# Altium schematic symbol library Water Tank Telemeter_1.SCHLIB: 82 symbols
Pins are listed as number, name and electrical type; pins without a type are passive.

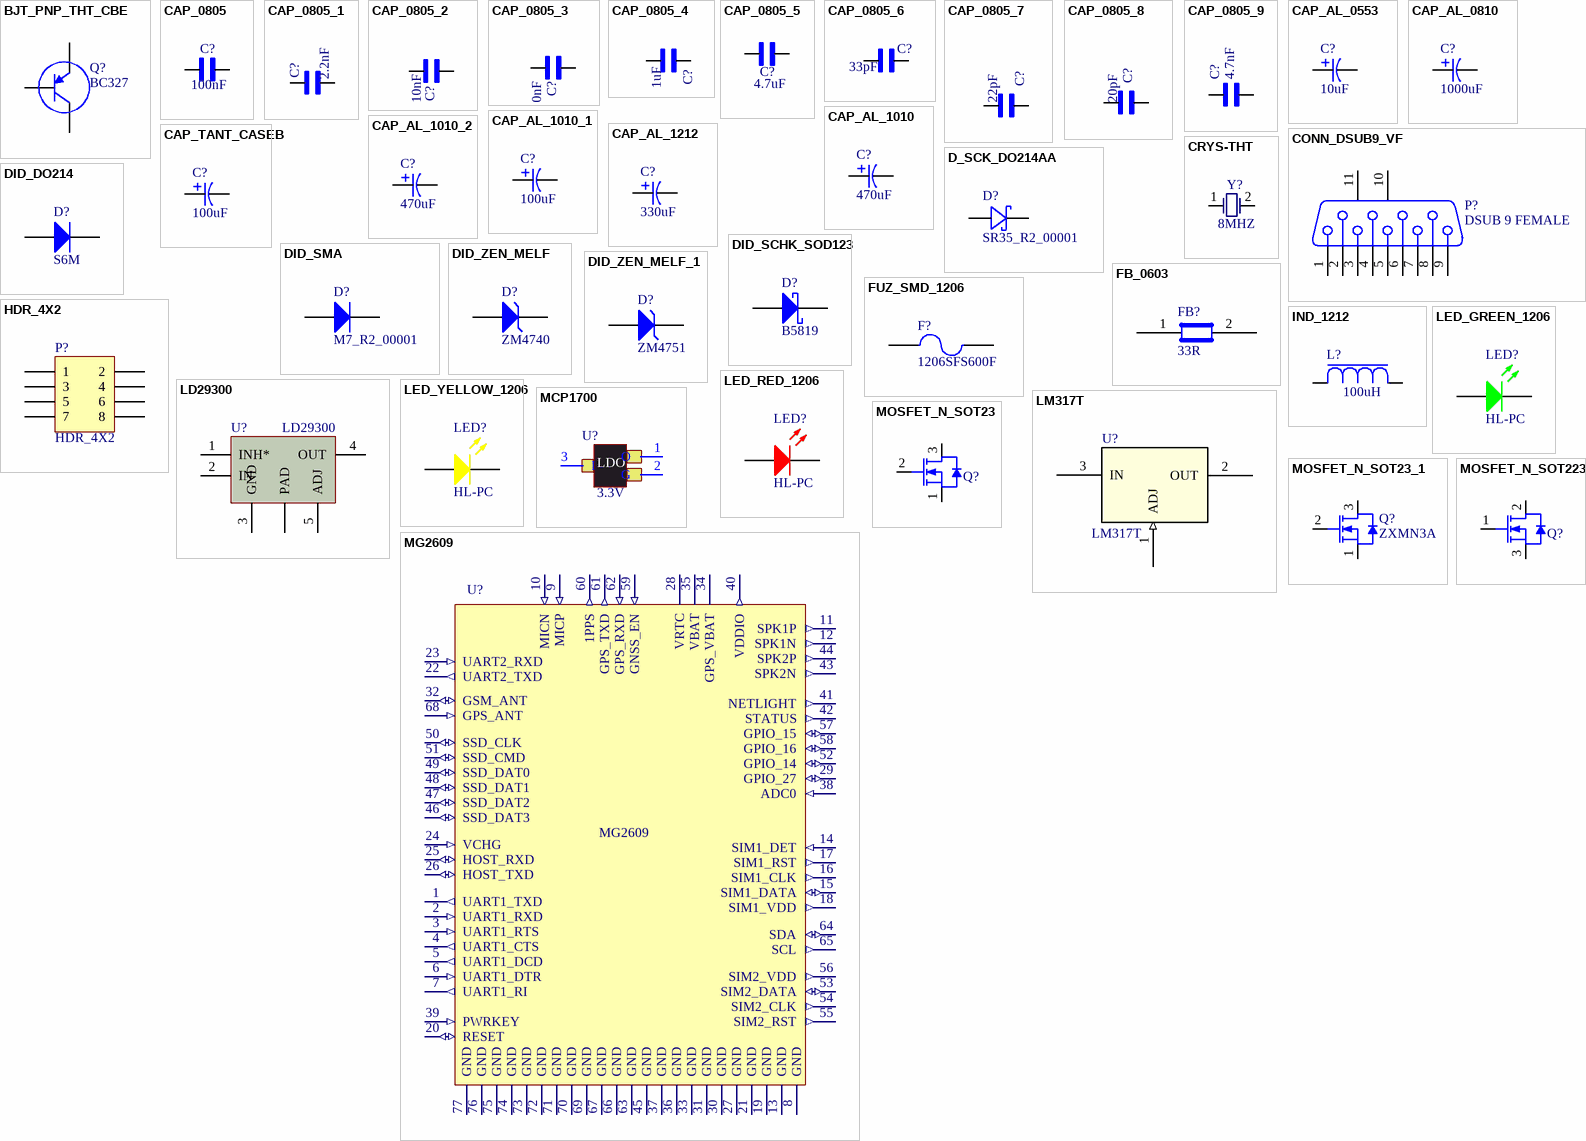
[diagram p0: symbols BJT_PNP_THT_CBE to MOSFET_N_SOT223]

## BJT_PNP_THT_CBE
designator Q?, comment BC327
=Product Description; Product Name: BC327-40ZL1G; Product Description: TRANSISTOR DIS.500mA 50V PNP TO92 AMP THT	TRANSISTOR DIS.500mA 50V PNP TO92 AMP THT; Package: TO-92; Value: BC327
footprint TO-92
pins: 1 C, 2 B, 3 E

## CAP_0805
designator C?, comment 100nF
Product Name: CL21B104JBCNNNC; Product Description: MLCC (2012) 0805 100nF 50VDC ±5% X7R; .Checked PCB: CHK; Package: 0805; Value: 100nF; .Checked SCH: CHK
footprint CAP_0805
pins: 1, 2

## CAP_0805_1
designator C?, comment 2.2nF
=Product Description; Product Name: CL21B222JBANNNC; Product Description: MLCC (2012) 0805 2.2nF 50VDC ±5% X7R; .Checked PCB: CHK; Package: 0805; Value: 2.2nF; .Checked SCH: CHK
footprint CAP_0805
pins: 1, 2

## CAP_0805_2
designator C?, comment 10nF
Product Name: CL21C103JBFNNNE; Product Description: MLCC (2012) 0805 10nF 50VDC ±5% C0G (NP0); .Checked PCB: CHK; Package: 0805; Value: 10nF; .Checked SCH: CHK
footprint CAP_0805
pins: 1, 2

## CAP_0805_3
designator C?, comment 330nF
=Product Description; Manufacturer: SAMSUNG; Product Name: CL21B334KOCNNNC; Product Description: MLCC (2012) 0805 330nF 16VDC ±10% X7R; .Checked PCB: CHK; Value: 330nF; Package / Case: 0805; .Checked SCH: CHK
footprint CAP_0805
pins: 1, 2

## CAP_0805_4
designator C?, comment 1uF
Product Name: CL21F105ZBFNNNE; Product Description: MLCC (2012) 0805 1uF 50VDC -20% +80% Y5V; .Checked PCB: CHK; Package: 0805; Value: 1uF; .Checked SCH: CHK
footprint CAP_0805
pins: 1, 2

## CAP_0805_5
designator C?, comment 4.7uF
MLCC (2012) 0805 4.7uF 25VDC ±10% X5R; Product Name: CL21A475KAQNNNE; .Checked PCB: CHK; Package: 0805; Product Description: MLCC (2012) 0805 4.7uF 25VDC ±10% X5R; Value: 4.7uF; .Checked SCH: CHK
footprint CAP_0805
pins: 1, 2

## CAP_0805_6
designator C?, comment 33pF
Product Name: CL21C330GBANNNC; Product Description: MLCC (2012) 0805 33pF 50VDC ±2% C0G (NP0); .Checked PCB: CHK; Package: 0805; Value: 33pF; .Checked SCH: CHK
footprint CAP_0805
pins: 1, 2

## CAP_0805_7
designator C?, comment 22pF
Product Name: CL21C220JBANNNC; Product Description: MLCC (2012) 0805 22pF 50VDC ±5% C0G (NP0); .Checked PCB: CHK; Package: 0805; Value: 22pF; .Checked SCH: CHK
footprint CAP_0805
pins: 1, 2

## CAP_0805_8
designator C?, comment 20pF
Product Name: CL21C200JBANNNC; Product Description: MLCC (2012) 0805 20pF 50VDC ±5% C0G (NP0); .Checked PCB: CHK; Package: 0805; Value: 20pF; .Checked SCH: CHK
footprint CAP_0805
pins: 1, 2

## CAP_0805_9
designator C?, comment 4.7nF
Product Name: CL21B472KB65PND; Product Description: MLCC (2012) 0805 4.7nF 50VDC ±10% X7R; .Checked PCB: CHK; Package: 0805; Value: 4.7nF; .Checked SCH: CHK
footprint CAP_0805
pins: 1, 2

## CAP_AL_0553
designator C?, comment 10uF
=Product Description; Manufacturer: SAMWHA; Product Name: SC1V106M05005VR; Product Description: CAP.EL.10uF 35V 5x5.3 85C SMD SAMWHA; .Checked PCB: CHK; Value: 10uF; .Checked SCH: CHK
footprint CAP_AL_0553
pins: 1, 2

## CAP_AL_0810
designator C?, comment 1000uF
=Product Description; Manufacturer: SAMYOUNG; Product Name: BXJ6.3VC1000MH10TP; Product Description: CAP.EL.1000uF 6V3 8x10 105C 5000Hrs SMD; .Checked PCB: CHK; Value: 1000uF; .Checked SCH: CHK
footprint CAP_AL_0810
pins: 1, 2

## CAP_AL_1010
designator C?, comment 470uF
=Product Description; Product Name: BDS25VC470MJ10TP; Product Description: CAP.EL.470uF 25V 10x10 105C 2000Hrs SMD; .Checked PCB: CHK; Value: 470uF; Dimensions (mm) DxL: 10.00x10.00; .Checked SCH: CHK
footprint CAP_Al_1010
pins: 1, 2

## CAP_AL_1010_1
designator C?, comment 100uF
=Product Description; Product Name: BXJ63VC100MJ10TP; Product Description: CAP.EL.100uF 63V 10x10 105C 5000Hrs SMD; .Checked PCB: CHK; Value: 100uF; Dimensions (mm) DxL: 10.00x10.00; .Checked SCH: CHK
footprint CAP_Al_1010
pins: 1, 2

## CAP_AL_1010_2
designator C?, comment 470uF
=Product Description; Product Name: BDS25VC470MJ10TP; Product Description: CAP.EL.470uF 25V 10x10 105C 2000Hrs SMD ±20%; .Checked PCB: CHK; Value: 470uF; Dimensions (mm) DxL: 10.00x10.00; .Checked SCH: CHK
footprint CAP_Al_1010
pins: 1, 2

## CAP_AL_1212
designator C?, comment 330uF
=Product Description; Product Name: SC1H337M1213MVR; Product Description: CAP.EL.330uF 50V 12.5x13.5 85C SMD SAMWHA; .Checked PCB: CHK; Value: 330uF; Dimensions (mm) DxL: 12.5X12.5; .Checked SCH: CHK
footprint CAP_AL_12d5X12d5
pins: 1, 2

## CAP_TANT_CASEB
designator C?, comment 100uF
=Product Descriptipn; Product Name: T491B107K006AT; Product Description: CAP.TANTAL 100uF 6.3V 10% B CASE (3528) SMD KEMET; .Checked PCB: CHK; Value: 100uF; Case Dimension (mm) LxWxH: B CASE; .Checked SCH: CHK
footprint CAP_TANT_CASEB
pins: 1, 2

## CONN_DSUB9_VF
designator P?, comment DSUB 9 FEMALE
=Product Description; Manufacturer: CONNFLY; Product Name: DS1034-01-09FBTSI3X; Product Description: CONNECTOR DSUB 9PIN 180C PCB TYPE FEMALE; Value: DSUB 9 FEMALE
footprint DSUB9_VF (Connector; D Subminiature; 9 Position; Right Angle; Pitch 1.385 mm)
signal-integrity model Connector
pins: 1, 2, 3, 4, 5, 6, 7, 8, 9, 10 MH1, 11 MH2

## CRYS-THT
designator Y?, comment 8MHZ
=Product Description; Product Name: AS-8.000-20-H35; Product Description: CRYSTAL 8MHZ HC49S 20pF 30ppm SHORT BULK RALTRON; .Checked PCB: CHK; Value: 8MHZ; Package / Case: HC-49S; .Checked SCH: CHK
footprint CRYS_THT
pins: 1, 2

## D_SCK_DO214AA
designator D?, comment SR35_R2_00001
Product Description; Manufacturer: PANJIT; Product Description: DIODE SCHOTTKY 3A 50V DO214AA SMB PANJIT; .Checked PCB: CHK; Product Name: SR35_R2_00001; Package / Case: DO214AA; .Checked SCH: CHK
footprint DO214AA
pins: 1, 2

## DID_DO214
designator D?, comment S6M
=Product Description; Product Name: S6M-DC; Product Description: DIODE 6A 1000V SMT DO214AB (SMC); .Checked PCB: CHK; Package: DO214AB; Value: S6M; .Checked SCH: CHK
footprint DO-214AB
pins: 1 K, 2 A

## DID_SCHK_SOD123
designator D?, comment B5819
=Product Description; Product Name: B5819W; Product Description: DIODE SCHOTTKY 1A 40V SOD123; .Checked PCB: CHK; Package: SOD123; Value: B5819; .Checked SCH: CHK
footprint SOD123
pins: 1 K, 2 A

## DID_SMA
designator D?, comment M7_R2_00001
=Product Description; Product Description: DIODE STAND. Single 1A 1000V SMT DO214AC (SMA); .Checked PCB: CHK; Product Name: M7_R2_00001; Package: SMA; Value: M7_R2_00001; .Checked SCH: CHK
footprint DID_SMA
pins: 1 A, 2 K

## DID_ZEN_MELF
designator D?, comment ZM4740
=Product Description; Product Name: ZM4740A-HT; Product Description: DIODE ZENER 1W 10V ±5% LL-41 (MELF) SMT; .Checked PCB: CHK; Package: MELF; Value: ZM4740; .Checked SCH: CHK
footprint MELF
pins: 1 K, 2 A

## DID_ZEN_MELF_1
designator D?, comment ZM4751
=Product Description; Product Name: ZM4751A-HT; Product Description: DIODE ZENER 1W 30V ±5% LL-41 (MELF) SMT; .Checked PCB: .; Package: MELF; Value: ZM4751; .Checked SCH: .
footprint MELF
pins: 1 K, 2 A

## FB_0603
designator FB?, comment 33R
=Product Description; Manufacturer: MURATA; Product Name: BLM18PG330SN1D; Product Description: FERRITE BEAD 0603 33R 3A MURATA; .Checked PCB: CHK; Value: 33R; Package / Case: 0603; .Checked SCH: CHK
footprint FB_0603
pins: 1, 2

## FUZ_SMD_1206
designator F?, comment 1206SFS600F
=Product Description; Product Name: 1206SFS600F/24-2; Product Description: FUSE BOARD MOUNT 6A 24VDC 1206; .Checked PCB: .; Package: 1206; Value: 1206SFS600F; .Checked SCH: .
footprint FUS_1206
pins: 1, 2

## HDR_4X2
designator P?
=Product Description; Product Description: Header, 4-Pin, Dual row; .Checked PCB: CHK; LatestRevisionDate: 17-Jul-2002; LatestRevisionNote: Re-released for DXP Platform.; Publisher: Altium Limited; .Checked SCH: CHK
footprint HDR2X4 (Connector; Header; 4x2 Position)
signal-integrity model Connector
pins: 1, 2, 3, 4, 5, 6, 7, 8

## IND_1212
designator L?, comment 100uH
=Product Description; Product Name: SRI1207-101M; Product Description: INDUCTOR POWER 100UH 12X12X8MM SMD; .Checked PCB: CHK; Inductance: 100uH; Dimensions (mm) LxWxH: 12.00x12.00x8.00; .Checked SCH: CHK; Value: 100uH
footprint IND_1212
pins: 1, 2

## LD29300
designator U?
=Product Description; Manufacturer: STM; Product Name: LD29300P2MTR; Product Description: IC-29300 REG. LDO. ADJ 3A P2PAK/A; .Checked SCH: CHK; Package / Case: P2PAK/A; .Checked PCB: CHK; Value: LD29300
footprint D2PAK/A
pins: 1 INH*, 2 IN, 3 GND, 4 OUT, 5 ADJ, PAD

## LED_GREEN_1206
designator LED?, comment HL-PC
=Product Description; Manufacturer: HONGLITRONIC; Product Description: LED SMD 1206 GREEN WATER CLEAR 600-800mcd; Product Name: HL-PC-3216U51GC; Color: GREEN; .Checked PCB: CHK; Value: HL-PC; .Checked SCH: CHK
footprint LED_GREEN_1206
pins: 1 K, 2 A

## LED_RED_1206
designator LED?, comment HL-PC
=Product Description; Manufacturer: HONGLITRONIC; Product Description: LED SMD 1206 RED WATER CLEAR 90-120 mcd 140C; Product Name: HL-PC-3216S9AC; Color: RED; .Checked PCB: CHK; Value: HL-PC; .Checked SCH: CHK
footprint LED_RED_1206
pins: 1 K, 2 A

## LED_YELLOW_1206
designator LED?, comment HL-PC
=Product Description; Manufacturer: HONGLITRONIC; Product Description: LED SMD 1206 YELLOW WATER CLEAR 90-120mcd 140C; Product Name: HL-PC-3216S29YC; Color: YELLOW; .Checked PCB: CHK; Value: HL-PC; .Checked SCH: CHK
footprint LED_YELLOW_1206
pins: 1 K, 2 A

## LM317T
designator U?
=Product Description; Product Name: LM317T-DG; Product Description: IC-317 V.REG/STABILIZER 1.5A TO220 DOUBLE GAUG ST; Value: LM317T; Package: TO220-3
footprint TO-220AB
pins: 1 ADJ (in), 2 OUT (power), 3 IN (power)

## MCP1700
designator U?, comment 3.3V
=Product Description; Product Name: MCP1700T-3302E/TT; Product Description: IC-1700 REG LDO 3.3V 0.25A SOT23-3; .Checked SCH: CHK; Package / Case: SOT23-3; Value: 3.3V; .Checked PCB: CHK
footprint SOT-23
pins: 1 O, 2 G, 3 I
text: LDO

## MG2609
designator U?
Product Description; Manufacturer: GOSUNCN; Product Name: HZ-MG2609-C1B-MK-01; Product Description: MODULE GSM/GPRS + ( OPTIONAL )GNSS; .Checked PCB: CHK; Package / Case: LCC (17.6 x 15.7 x 2.3); Value: MG2609; .Checked SCH: CHK
footprint LCC_17P6X15P7X2P3
pins: 1 UART1_TXD (out), 2 UART1_RXD (in), 3 UART1_RTS (in), 4 UART1_CTS (out), 5 UART1_DCD (out), 6 UART1_DTR (in), 7 UART1_RI (out), 8 GND (power), 9 MICP (in), 10 MICN (in), 11 SPK1P (out), 12 SPK1N (out), 13 GND (power), 14 SIM1_DET (in), 15 SIM1_DATA (io), 16 SIM1_CLK (out), 17 SIM1_RST (out), 18 SIM1_VDD (out), 19 GND (power), 20 RESET (io), 21 GND (power), 22 UART2_TXD (out), 23 UART2_RXD (in), 24 VCHG (in), 25 HOST_RXD (io), 26 HOST_TXD (io), 27 GND (power), 28 VRTC (power), 29 GPIO_27 (io), 30 GND (power), 31 GND (power), 32 GSM_ANT (io), 33 GND (power), 34 GPS_VBAT (power), 35 VBAT (power), 36 GND (power), 37 GND (power), 38 ADC0 (in), 39 PWRKEY (in), 40 VDDIO (out), 41 NETLIGHT (out), 42 STATUS (out), 43 SPK2N (out), 44 SPK2P (out), 45 GND (power), 46 SSD_DAT3 (io), 47 SSD_DAT2 (io), 48 SSD_DAT1 (io), 49 SSD_DAT0 (io), 50 SSD_CLK (io), 51 SSD_CMD (io), 52 GPIO_14 (io), 53 SIM2_DATA (io), 54 SIM2_CLK (out), 55 SIM2_RST (out), 56 SIM2_VDD (out), 57 GPIO_15 (io), 58 GPIO_16 (io), 59 GNSS_EN (in), 60 1PPS (out), 61 GPS_TXD (out), 62 GPS_RXD (in), 63 GND (power), 64 SDA (io), 65 SCL (out), 66 GND (power), 67 GND (power), 68 GPS_ANT (in), 69 GND (power), 70 GND (power), 71 GND (power), 72 GND (power), 73 GND (power), 74 GND (power), 75 GND (power), 76 GND (power), 77 GND (power)

## MOSFET_N_SOT23
designator Q?, comment UTM2054G  (value not drawn)
=Product Description; Manufacturer: UTC; Product Name: UTM2054G-AE3-R; Product Description: MOSFET DIS.5A 20V N-CH SOT23 ENHANCEMENT SMT; .Checked PCB: CHK; Package / Case: SOT23; Value: UTM2054G; .Checked SCH: CHK
footprint SOT-23
pins: 1 S, 2 G, 3 D

## MOSFET_N_SOT23_1
designator Q?, comment ZXMN3A
=Product Description; Manufacturer: DIODES; Product Name: ZXMN3A01FTA; Product Description: MOSFET DIS.1.8A 30V N-CH SOT23 ENHANCEMENT SMT; .Checked PCB: .; Package / Case: SOT23; Value: ZXMN3A; .Checked SCH: .
footprint SOT-23
pins: 1 S, 2 G, 3 D

## MOSFET_N_SOT223
designator Q?, comment NDT3055L  (value not drawn)
=Product Description; Manufacturer: ONS; Product Description: MOSFET DIS.4A 60V N-CH SOT223 ENHANCEMENT SMT; .Checked PCB: CHK; Product Name: NDT3055L; Package / Case: SOT223; Value: NDT3055L; .Checked SCH: CHK
footprint SOT223
pins: 1 G, 2 D, 3 S

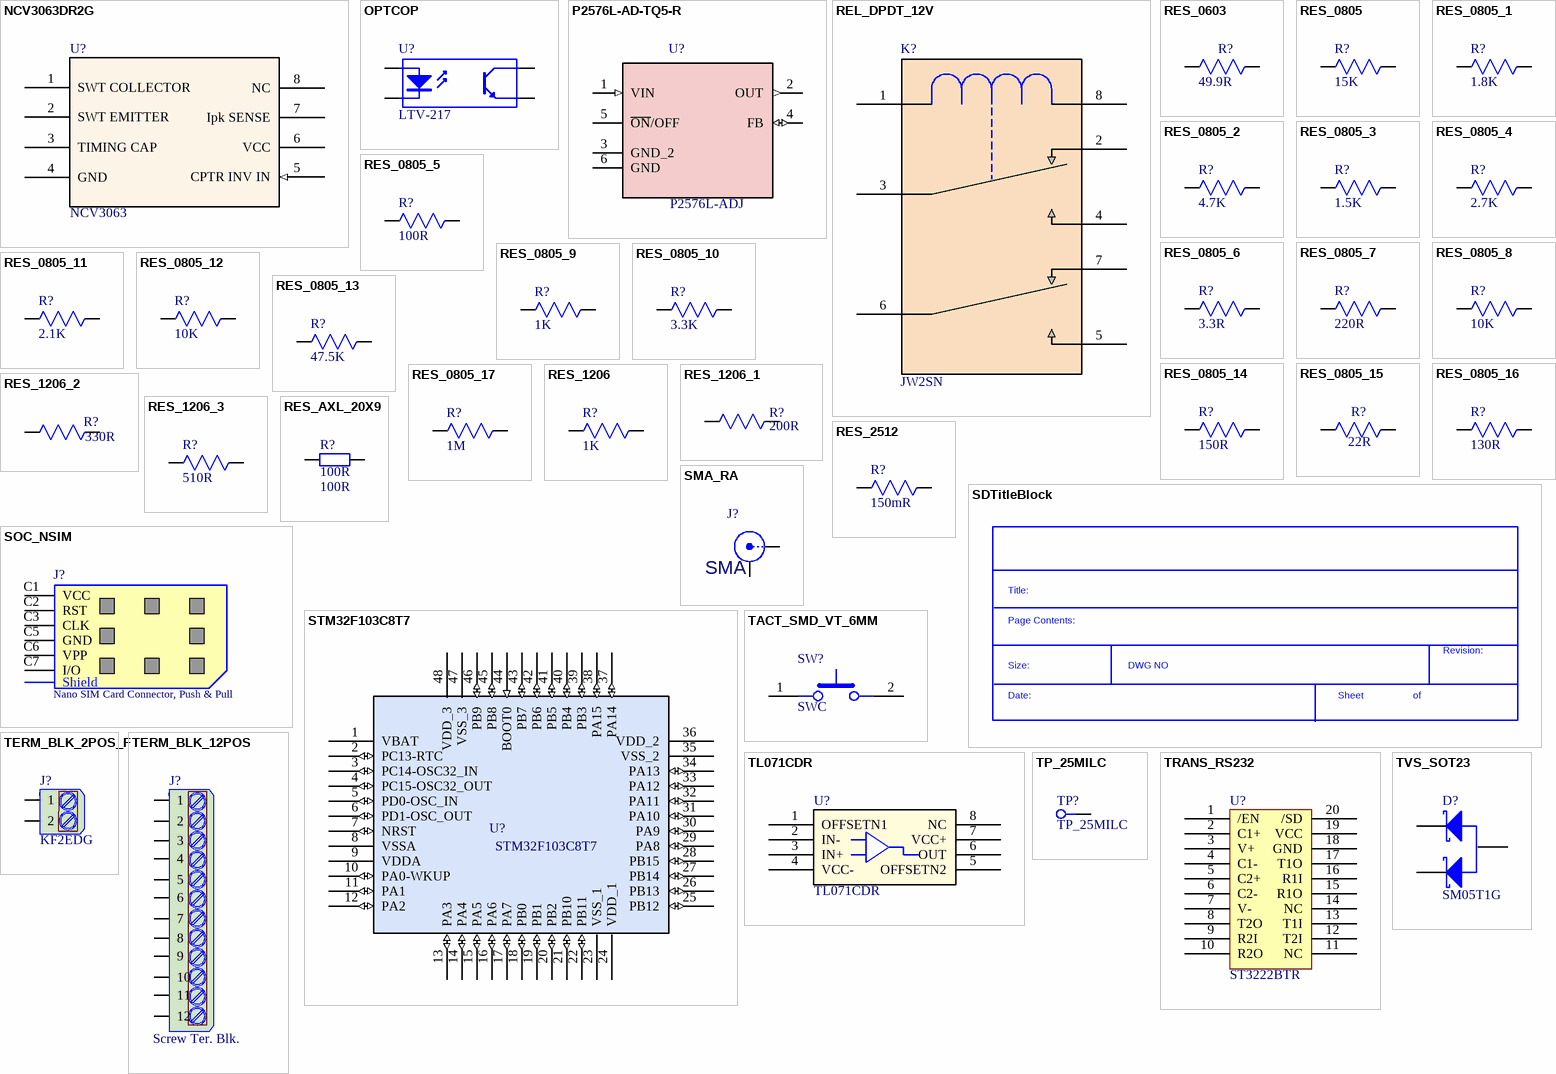
[diagram p1: symbols NCV3063DR2G to TVS_SOT23]

## NCV3063DR2G
designator U?, comment NCV3063
=Product Description; Product Name: NCV3063DR2G; Product Description: IC-3063 INV. SWITCHING REGULATORS SOIC8 SMD ONS; .Checked PCB: CHK; Package: SOIC8; Value: NCV3063; .Checked SCH: CHK
footprint SOIC-8
pins: 1 SWT COLLECTOR, 2 SWT EMITTER, 3 TIMING CAP, 4 GND (power), 5 CPTR INV IN (in), 6 VCC (power), 7 Ipk SENSE, 8 NC

## OPTCOP
designator U?, comment LTV-217
=Product Description; Manufacturer: LITEON; Product Name: LTV-217-B-G; Product Description: IC-217 OPTO. 3750V SSOP4; .Checked PCB: CHK; Package: SSOP4; Value: LTV-217; .Checked SCH: CHK
footprint SSOP-4
pins: 1 A "Anode", 2 K "Cathode", 3 E "Emitter", 4 C "Collector"

## P2576L-AD-TQ5-R
designator U?, comment P2576L-ADJ
IC-2576 V.REG.3A ADJ SIMPL.STEP-DOWN SMD TO-263; Manufacturer: UTC; Product Name: P2576L-AD-TQ5-R; .Checked PCB: CHK; Product Description: IC-2576 V.REG.3A ADJ SIMPL.STEP-DOWN SMD TO-263; Package / Case: TO263-5 (D2PAK-5); .Checked SCH: CHK
footprint TO170P1435X465-6N
pins: 1 VIN (in), 2 OUT (out), 3 GND_2, 4 FB (io), 5 ~{ON}/OFF, 6 GND

## REL_DPDT_12V
designator K?, comment JW2SN
=Product Description; Product Name: JW2SN-DC12V; Product Description: RELAY POWER 5A 12VDC 2P PANASONIC; Contact Form: DPDT; .Checked PCB: CHK; Value: JW2SN; .Checked SCH: CHK
footprint RELAY_DPDT
pins: 1, 2 5, 3, 4, 5 3, 6, 7 8, 8 2

## RES_0603
designator R?, comment 49.9R
=Product Description; Product Name: TC0325D499JT5C; Product Description: RES.(1608) 0603 49.9 Ohms 0.5% 1/16W 25PPM; Tolerance: ±0.5%; Watt: 1/16W; .Checked PCB: CHK; Package / Case: 0603; Value: 49.9R; .Checked SCH: CHK
footprint RES_0603
pins: 1, 2

## RES_0805
designator R?, comment 15K
=Product Description; Product Name: 0805S8J0153T5E; Product Description: RES.(2012) 0805 15K Ohms 5% 1/8W-S 100PPM; .Checked PCB: .; Package: 0805; Value: 15K; .Checked SCH: .
footprint RES_0805
pins: 1, 2

## RES_0805_1
designator R?, comment 1.8K
=Product Description; Product Name: 0805S8J0182T5E; Product Description: RES.(2012) 0805 1.8K Ohms 5% 1/8W-S 100PPM; Tolerance: ±5%; Watt: 1/8W-S; .Checked PCB: CHK; Package / Case: 0805; Value: 1.8K; .Checked SCH: CHK
footprint RES_0805
pins: 1, 2

## RES_0805_2
designator R?, comment 4.7K
=Product Description; Product Name: 0805S8J0472T5E; Product Description: RES.(2012) 0805 4.7K Ohms 5% 1/8W-S 100PPM; Tolerance: ±5%; Watt: 1/8W-S; .Checked PCB: CHK; Package / Case: 0805; Value: 4.7K; .Checked SCH: CHK
footprint RES_0805
pins: 1, 2

## RES_0805_3
designator R?, comment 1.5K
=Product Description; Product Name: 0805S8F1501T5E; Product Description: RES.(2012) 0805 1.5K Ohms 1% 1/8W-S 100PPM; Tolerance: ±1%; Watt: 1/8W-S; .Checked PCB: CHK; Package / Case: 0805; Value: 1.5K; .Checked SCH: CHK
footprint RES_0805
pins: 1, 2

## RES_0805_4
designator R?, comment 2.7K
=Product Description; Product Name: 0805S8F2701T5E; Product Description: RES.(2012) 0805 2.7K Ohms 1% 1/8W-S 100PPM; Tolerance: ±1%; Watt: 1/8W-S; .Checked PCB: CHK; Package / Case: 0805; Value: 2.7K; .Checked SCH: CHK
footprint RES_0805
pins: 1, 2

## RES_0805_5
designator R?, comment 100R
=Product Description; Product Name: 0805S8F1000T5E; Product Description: RES.(2012) 0805 100 Ohms 1% 1/8W-S 200PPM; Tolerance: ±1%; Watt: 1/8W-S; .Checked PCB: CHK; Package / Case: 0805; Value: 100R; .Checked SCH: CHK
footprint RES_0805
pins: 1, 2

## RES_0805_6
designator R?, comment 3.3R
=Product Description; Product Name: RC2012F3R3CS; Product Description: RES.(2012) 0805 3.3 Ohms 1% 1/8W +300PPM~-200PPM; Tolerance: ±1%; Watt: 1/8W; .Checked PCB: CHK; Package / Case: 0805; Value: 3.3R; .Checked SCH: CHK
footprint RES_0805
pins: 1, 2

## RES_0805_7
designator R?, comment 220R
=Product Description; Product Name: ERJ-P06D2200V; Product Description: RES.(2012) 0805 220 Ohms 0.5% 1/2W 100PPM; Tolerance: ±0.5%; Watt: 1/2W; .Checked PCB: CHK; Package / Case: 0805; Value: 220R; .Checked SCH: CHK
footprint RES_0805
pins: 1, 2

## RES_0805_8
designator R?, comment 10K
=Product Description; Product Name: 0805S8F1002T5E; Product Description: RES.(2012) 0805 10K Ohms 1% 1/8W-S 100PPM; Tolerance: ±1%; Watt: 1/8W-S; .Checked PCB: CHK; Package / Case: 0805; Value: 10K; .Checked SCH: CHK
footprint RES_0805
pins: 1, 2

## RES_0805_9
designator R?, comment 1K
=Product Description; Product Name: 0805S8F1001T5E; Product Description: RES.(2012) 0805 1K Ohms 1% 1/8W-S 100PPM; Tolerance: ±1%; Watt: 1/8W-S; .Checked PCB: CHK; Package / Case: 0805; Value: 1K; .Checked SCH: CHK
footprint RES_0805
pins: 1, 2

## RES_0805_10
designator R?, comment 3.3K
=Product Description; Product Name: 0805S8F3301T5E; Product Description: RES.(2012) 0805 3.3K Ohms 1% 1/8W-S 100PPM; Tolerance: ±1%; Watt: 1/8W-S; .Checked PCB: CHK; Package / Case: 0805; Value: 3.3K; .Checked SCH: CHK
footprint RES_0805
pins: 1, 2

## RES_0805_11
designator R?, comment 2.1K
=Product Description; Product Name: 0805S8F2101T5E; Product Description: RES.(2012) 0805 2.1K Ohms 1% 1/8W-S 100PPM; Tolerance: ±1%; Watt: 1/8W-S; .Checked PCB: CHK; Package / Case: 0805; Value: 2.1K; .Checked SCH: CHK
footprint RES_0805
pins: 1, 2

## RES_0805_12
designator R?, comment 10K
=Product Description; Product Name: 0805S8J0103T5E; Package2: 0805; Product Description: RES.(2012) 0805 10K Ohms 5% 1/8W-S 100PPM; .Checked PCB: CHK; Value: 10K; .Checked SCH: CHK
footprint RES_0805
pins: 1, 2

## RES_0805_13
designator R?, comment 47.5K
=Product Description; Product Name: 0805S8F4752T5E; Package2: 0805; Product Description: RES.(2012) 0805 47.5K Ohms 1% 1/8W-S 100PPM; .Checked PCB: CHK; Value: 47.5K; .Checked SCH: CHK
footprint RES_0805
pins: 1, 2

## RES_0805_14
designator R?, comment 150R
=Product Description; Product Name: 0805S8J0151T5E; Package2: 0805; Product Description: RES.(2012) 0805 150 Ohms 5% 1/8W-S 100PPM; .Checked PCB: CHK; Value: 150R; .Checked SCH: CHK
footprint RES_0805
pins: 1, 2

## RES_0805_15
designator R?, comment 22R
=Product Description; Product Name: CQ05S8F220JT5E; Package2: 0805; Product Description: RES.(2012) 0805 22 Ohms 1% 1/8W-S AUTOMOTIV; .Checked PCB: CHK; Value: 22R; .Checked SCH: CHK
footprint RES_0805
pins: 1, 2

## RES_0805_16
designator R?, comment 130R
=Product Description; Product Name: 0805S8J0131T5E; Package2: 0805; Product Description: RES.(2012) 0805 130 Ohms 5% 1/8W-S 100PPM; .Checked PCB: CHK; Value: 130R; .Checked SCH: CHK
footprint RES_0805
pins: 1, 2

## RES_0805_17
designator R?, comment 1M
=Product Description; Product Name: RC2012F105AS; Product Description: RES.(2012) 0805 1M Ohms 1% 1/8W 100PPM; .Checked PCB: CHK; Package: 0805; Value: 1M; .Checked SCH: CHK
footprint RES_0805
pins: 1, 2

## RES_1206
designator R?, comment 1K
=Product Description; Product Name: 1206S4F1001T5E; Product Description: RES.(3216) 1206 1K Ohms 1% 1/4W-S 100PPM; Tolerance: ±1%; Watt: 1/4W-S; Package / Case: 1206 (3216 Metric); Value: 1K; .Checked PCB: 1206S4F1001T5E; .Checked SCH: 1206S4F1001T5E
footprint RES_1206
pins: 1, 2

## RES_1206_1
designator R?, comment 200R
=Product Description; Product Name: CQ06W4F2000T5E; Product Description: RES.(3216) 1206 200 Ohms 1% 1/4W-S AUTOMOTIV; .Checked PCB: CHK; Package: 1206; Value: 200R; .Checked SCH: CHK
footprint RES_1206
pins: 1, 2

## RES_1206_2
designator R?, comment 330R
=Product Description; Product Name: CQ06W4F3300T5E; Product Description: RES.(3216) 1206 330 Ohms 1% 1/4W-S AUTOMOTIV; .Checked PCB: CHK; Package: 1206; Value: 330R; .Checked SCH: CHK
footprint RES_1206
pins: 1, 2

## RES_1206_3
designator R?, comment 510R
=Product Description; Product Name: 1206S4J0511T5E; Product Description: RES.(3216) 1206 510 Ohms 5% 1/4W-S 100PPM; .Checked PCB: CHK; Package: 1206; Value: 510R; .Checked SCH: CHK
footprint RES_1206
pins: 1, 2

## RES_2512
designator R?, comment 150mR
=Product Description; Product Name: HP122WF150LT4E; Product Description: RES.(6432) 2512 150m Ohms 1% 2W 200PPM; .Checked PCB: .; Package: 2512; Value: 150mR; .Checked SCH: .
footprint RES_2512
pins: 1, 2

## RES_AXL_20X9
designator R?, comment 100R
=Product Description; Product Name: PRW05WJP101B00; Product Description: RES.CEMENT 5W 100 Ohms 5% THT; .Checked PCB: CHK; Package: AXIAL; Value: 100R; .Checked SCH: CHK
footprint RES_AXL_22X9
pins: 1, 2

## SDTitleBlock
designator *?  (value not drawn)  (graphical)
text: Title:; Page Contents:; Revision:; Size:; DWG NO; Date:; Sheet; of

## SMA_RA
designator J?, comment SMA
=Product Description; Product Name: L-KLS1-SMA045; Product Description: CONNECTOR SMA 5PIN THT R/A 8x8x14.8MM; .Checked PCB: CHK; Mounting Type: THT R/A; .Checked SCH: CHK; Value: SMA
footprint CONN_SMA_H
pins: 1, 2

## SOC_NSIM
designator J?, comment Nano SIM Card Connector, Push & Pull
=Product Description; Manufacturer: ATTEND; Product Name: 115U-A000; Product Description: CONNECTOR NANO SIM CARD PUSH PULL 6PIN H:1.2MM; Number of Position: 6; Eject Mechanism: PUSH-PULL; .Checked PCB: CHK; .Checked SCH: CHK
footprint SOC_NSIM (Nano SIM Card Connector, Push & Pull)
pins: C1 VCC, C2 RST, C3 CLK, C5 GND, C6 VPP, C7 I/O, Shield

## STM32F103C8T7
designator U?
IC-32F103C MCU 32BIT 64KB FLASH 48LQFP; Product Name: STM32F103C8T7TR; .Checked PCB: CHK; Link: https://www.ozdisan.com/integrated-circuits-ics/embedded-ics/microcontrollers/STM32F103C8T7TR; .Checked SCH: CHK
footprint LQFP-48
pins: 1 VBAT (power), 2 PC13-RTC (io), 3 PC14-OSC32_IN (io), 4 PC15-OSC32_OUT (io), 5 PD0-OSC_IN (io), 6 PD1-OSC_OUT (io), 7 NRST (io), 8 VSSA (power), 9 VDDA (power), 10 PA0-WKUP (io), 11 PA1 (io), 12 PA2 (io), 13 PA3 (io), 14 PA4 (io), 15 PA5 (io), 16 PA6 (io), 17 PA7 (io), 18 PB0 (io), 19 PB1 (io), 20 PB2 (io), 21 PB10 (io), 22 PB11 (io), 23 VSS_1 (power), 24 VDD_1 (power), 25 PB12 (io), 26 PB13 (io), 27 PB14 (io), 28 PB15 (io), 29 PA8 (io), 30 PA9 (io), 31 PA10 (io), 32 PA11 (io), 33 PA12 (io), 34 PA13 (io), 35 VSS_2 (power), 36 VDD_2 (power), 37 PA14 (io), 38 PA15 (io), 39 PB3 (io), 40 PB4 (io), 41 PB5 (io), 42 PB6 (io), 43 PB7 (io), 44 BOOT0 (in), 45 PB8 (io), 46 PB9 (io), 47 VSS_3 (power), 48 VDD_3 (power)

## TACT_SMD_VT_6MM
designator SW?, comment SWC
=Product Description; .Checked PCB: CHK; Product Name: DTSMF-31R-V-T/R; Product Description: SWITCH TACT 6x3.5MM 4.3MM 260gf SMD DIPTRONICS; .Checked SCH: CHK; Outline: SWC; Value: SWC
footprint TAC_0603_VT
pins: 1, 2

## TERM_BLK_2POS_F
designator J?, comment KF2EDG
=Product Description; Product Name: KF2EDG-5.08-2P-14; Product Description: TERM.BLK.5.08MM 2P FEMALE GREEN; ComponentLink1URL: https://www.ozdisan.com/konnektor-ve-baglanti-elemanlari/klemensler/gecmeli-klemensler/KF2EDG-5-08-2P-14; ComponentLink1Description: TERM.BLK.5.08MM 2P FEMALE GREEN; Value: KF2EDG
footprint TERM_BLK_2P_F
pins: 1, 2

## TERM_BLK_12POS
designator J?, comment Screw Ter. Blk.
=Product Description; Product Name: GT301-5.0-12P-12-00AH; Product Description: TERM.BLK.5.00MM 12P PCB TYPE; .Checked PCB: CHK; ComponentLink1URL: https://www.molex.com/pdm_docs/sd/395321002_sd.pdf; ComponentLink1Description: https://www.molex.com/pdm_docs/sd/395321002_sd.pdf; Value: Screw Ter. Blk.; .Checked SCH: CHK
footprint TERM_BLK_12P
pins: 1, 2, 3, 4, 5, 6, 7, 8, 9, 10, 11, 12

## TL071CDR
designator U?
=Product Description; Manufacturer: SOIC8; Product Description: IC-071 OPAMP JFET 3MHZ SOIC8; Value: TL071CDR; Product Name: TL071CDR; Package: SOIC8
footprint SOIC-8
pins: 1 OFFSETN1, 2 IN-, 3 IN+, 4 VCC- (power), 5 OFFSETN2, 6 OUT, 7 VCC+ (power), 8 NC

## TP_25MILC
designator TP?  (no BOM)
Test Point 25mil
footprint TP
pins: 1

## TRANS_RS232
designator U?, comment ST3222BTR
=Product Description; Product Description: IC-3222 DRIVER/RCVR RS232 LP 20-TSSOP; .Checked PCB: CHK; Product Name: ST3222BTR; Package: TSSOP20; Value: ST3222BTR; .Checked SCH: CHK
footprint TSSOP20 (Footprint not found)
pins: 1 /EN, 2 C1+, 3 V+, 4 C1-, 5 C2+, 6 C2-, 7 V-, 8 T2O, 9 R2I, 10 R2O, 11 NC, 12 T2I, 13 T1I, 14 NC, 15 R1O, 16 R1I, 17 T1O, 18 GND, 19 VCC, 20 /SD

## TVS_SOT23
designator D?, comment SM05T1G
=Product Description; Product Description: DIODE TVS 5VWM 9.8VC SOT23; .Checked PCB: CHK; Product Name: SM05T1G; Value: SM05T1G; Package: SOT23; .Checked SCH: CHK
footprint SOT-23
pins: 1, 2, 3

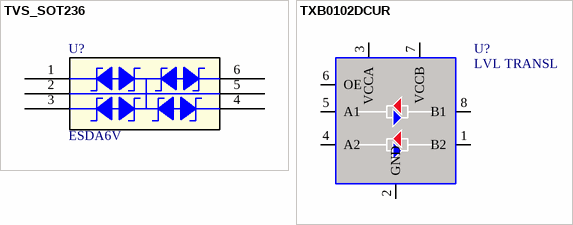
[diagram p2: symbols TVS_SOT236 to TXB0102DCUR]

## TVS_SOT236
designator U?, comment ESDA6V
=Product Description; Manufacturer: STM; Product Name: ESDA6V1BC6; Product Description: DIODE TVS 80W 5V SOT23 SMD; .Checked PCB: CHK; Package / Case: SOT23-6; .Checked SCH: CHK
footprint SOT23-6L
pins: 1, 2, 3, 4, 5, 6

## TXB0102DCUR
designator U?, comment LVL TRANSL
=Product Description; Manufacturer: TEXAS; Product Name: TXB0102DCUR; Product Description: IC-102 VOLT-LVL TRANSL BI-DIR US8; .Checked SCH: CHK; Value: LVL TRANSL; Package / Case: VSSOP8; .Checked PCB: CHK
footprint VSSOP8
pins: 1 B2, 2 GND, 3 VCCA, 4 A2, 5 A1, 6 OE, 7 VCCB, 8 B1